# Altium schematic symbol library 0451005PMRL.SchLib: 1 symbol
Pins are listed as number, name and electrical type; pins without a type are passive.

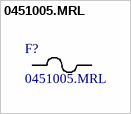
[diagram p0: symbol 0451005.MRL]

## 0451005.MRL
designator F?
No Description Available; Manufacturer_Name: Littelfuse Inc; Copyright: Copyright (C) 2026 Ultra Librarian. All rights reserved.; Manufacturer_Part_Number: 0451005.MRL
footprint 0451Series_LTF
pins: 1, 2